# Altium footprint library WC_.PcbLib: 20 footprints (part 1 of 2)
Each footprint in its own frame and in the unit in brackets; x right, y up, seen from the top. Pads: shape width x height; smd on the part's side, far side on the other; paste and mask are expansions set on the pad; w line width, h text height; cw(c..) or ccw(c..) is an arc to the next point about the centre after c.
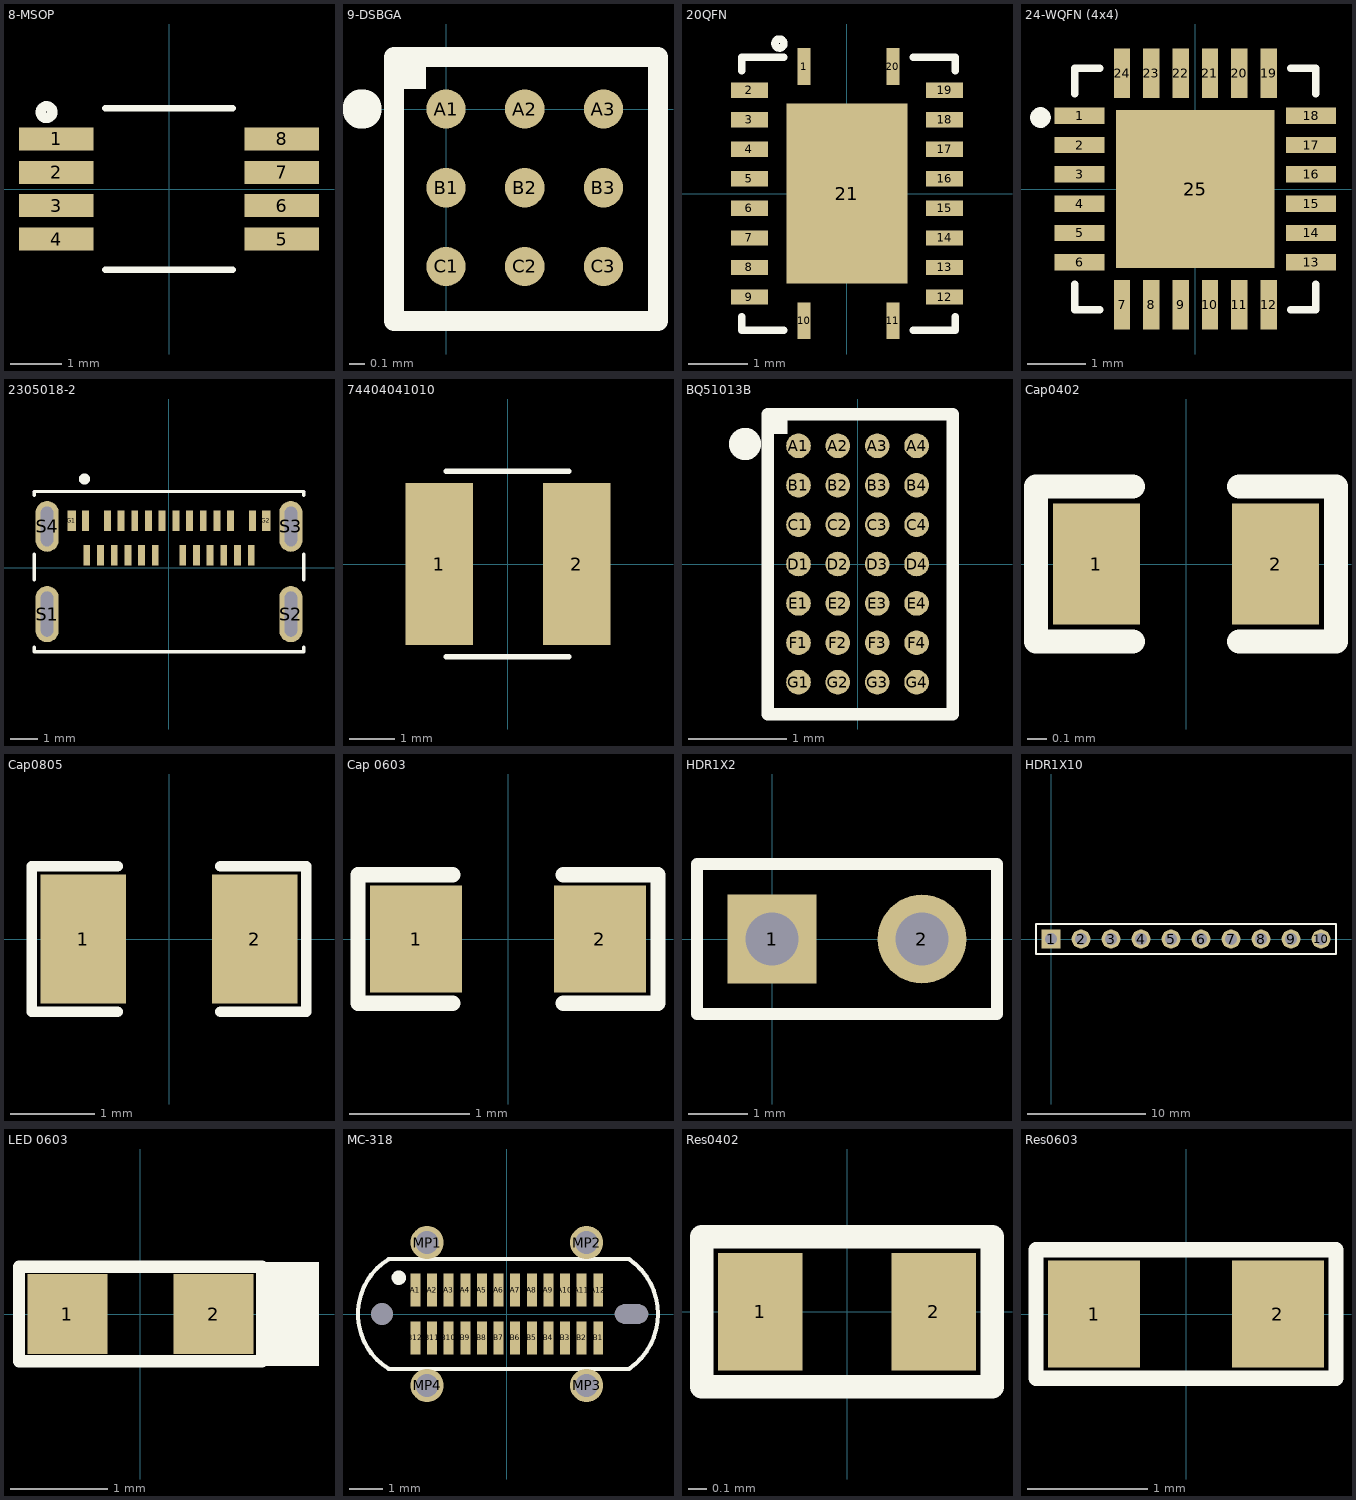
[diagram p0: the footprints below, top view; thin cyan lines are the x and y axes]

## 8-MSOP [mm]
pads (8):
  rect 1.45x0.45 smd: 1(-2.2,0.975) 2(-2.2,0.325) 3(-2.2,-0.325) 4(-2.2,-0.975) 5(2.2,-0.975) 6(2.2,-0.325) 7(2.2,0.325) 8(2.2,0.975)
Top Overlay:
  circle w0.2: c-2.388,1.499 r0.114
  lines w0.127: -1.245,-1.575 1.245,-1.575 ; -1.245,1.575 1.245,1.575
3D body "User Library-MSOP-8 MSOP-8L.step": height 1.01, standoff 0, extent -2.46,-1.525 2.46,1.525

## 9-DSBGA [mm]
pads (9):
  round 0.25 smd mask+0.055: A1(0,0) A2(0.5,0) A3(1,0) B1(0,-0.5) B2(0.5,-0.5) B3(1,-0.5) C1(0,-1) C2(0.5,-1) C3(1,-1)
Top Overlay:
  circle w0.2: c-0.533,0 r0.025
  rectangle: -0.33,0.127 -0.127,0.33
  lines w0.127: -0.33,-1.346 -0.33,0.33 1.346,0.33 1.346,-1.346 -0.33,-1.346
3D body "CSD75207W15--3DModel-STEP-231308.STEP": height 0.63, standoff 0, extent -0.302,-1.298 1.318,0.282

## 20QFN [mm]
pads (21):
  rect 0.22x0.62 smd: 1(-0.725,2.15) 10(-0.725,-2.15) 11(0.775,-2.15) 20(0.775,2.15)
  rect 0.62x0.26 smd: 2(-1.65,1.75) 3(-1.65,1.25) 4(-1.65,0.75) 5(-1.65,0.25) 6(-1.65,-0.25) 7(-1.65,-0.75) 8(-1.65,-1.25) 9(-1.65,-1.75) 12(1.65,-1.75) 13(1.65,-1.25) 14(1.65,-0.75) 15(1.65,-0.25) 16(1.65,0.25) 17(1.65,0.75) 18(1.65,1.25) 19(1.65,1.75)
  rect 2.05x3.05 smd: 21(0,0)
Top Overlay:
  circle w0.127: c-1.143,2.54 r0.076
  lines w0.127: -1.778,-2.083 -1.778,-2.311 -1.067,-2.311 ; -1.778,2.083 -1.778,2.311 -1.067,2.311 ; 1.118,-2.311 1.829,-2.311 1.829,-2.083 ; 1.118,2.311 1.829,2.311 1.829,2.083
3D body "User Library-20-VQFN (3_5x4_5).step": height 0.88, standoff -0.02, extent -1.735,-2.259 1.785,2.261

## 24-WQFN (4x4) [mm]
pads (25):
  rect 0.85x0.28 smd: 1(-1.975,1.25) 2(-1.975,0.75) 3(-1.975,0.25) 4(-1.975,-0.25) 5(-1.975,-0.75) 6(-1.975,-1.25) 13(1.975,-1.25) 14(1.975,-0.75) 15(1.975,-0.25) 16(1.975,0.25) 17(1.975,0.75) 18(1.975,1.25)
  rect 0.28x0.85 smd: 7(-1.25,-1.975) 8(-0.75,-1.975) 9(-0.25,-1.975) 10(0.25,-1.975) 11(0.75,-1.975) 12(1.25,-1.975) 19(1.25,1.975) 20(0.75,1.975) 21(0.25,1.975) 22(-0.25,1.975) 23(-0.75,1.975) 24(-1.25,1.975)
  rect 2.7x2.7 smd: 25(0,0)
Top Overlay:
  circle w0.2: c-2.642,1.219 r0.076
  lines w0.127: -2.057,-1.626 -2.057,-2.057 -1.626,-2.057 ; -2.057,1.626 -2.057,2.057 -1.626,2.057 ; 1.626,-2.057 2.057,-2.057 2.057,-1.626 ; 1.626,2.057 2.057,2.057 2.057,1.626
3D body "CP2104-F03-GMR.STEP": height 0.78, standoff -0.02, extent -2,-2 2,2

## 2305018-2 [mm] "CONN RCP USB3.1 TYPEC 24P SMD RA"
pads (30):
  rect 0.25x0.75 smd: A1(-3.05,1.7) A2(-2.25,1.7) A3(-1.75,1.7) A4(-1.25,1.7) A5(-0.75,1.7) A6(-0.25,1.7) A7(0.25,1.7) A8(0.75,1.7) A9(1.25,1.7) A10(1.75,1.7) A11(2.25,1.7) A12(3.05,1.7) B1(3,0.45) B2(2.5,0.45) B3(2,0.45) B4(1.5,0.45) B5(1,0.45) B6(0.5,0.45) B7(-0.5,0.45) B8(-1,0.45) B9(-1.5,0.45) B10(-2,0.45) B11(-2.5,0.45) B12(-3,0.45)
  rect 0.3x0.75 smd: G1(-3.55,1.7) G2(3.55,1.7)
  oval 0.85x2.05 hole 0.45 slot 1.65 at 90 deg: S1(-4.45,-1.7) S2(4.45,-1.7)
  oval 0.85x1.85 hole 0.45 slot 1.45 at 90 deg: S3(4.45,1.5) S4(-4.45,1.5)
Top Overlay:
  circle w0.2: c-3.085,3.232 r0.1
  lines w0.127: -4.925,-2.906 -4.925,-3.075 4.925,-3.075 4.925,-2.906 ; -4.925,-0.444 -4.925,0.48 ; -4.925,2.634 -4.925,2.775 4.925,2.775 4.925,2.634 ; 4.925,-0.444 4.925,0.48
Mechanical 13:
  lines w0.127: -4.925,2.775 4.925,2.775
3D body "2305018-2--3DModel-STEP-56544.STEP": height 3.53, standoff -0.53, extent -4.919,-5.856 4.919,2.794

## 74404041010 [mm]
pads (2):
  rect 1.5x3.6 smd: 1(-1.525,0) 2(1.525,0)
Top Overlay:
  lines w0.127: -1.372,-2.057 1.346,-2.057 ; -1.372,2.057 1.346,2.057
3D body "Download_STP_WE-LQS-4012 (rev1).stp": height 1.17, standoff -0.03, extent -2,-2 2,2

## BQ51013B [mm] "IC WIRELESS PWR RCVR 28DSBGA"
pads (28):
  round 0.25 smd mask+0.055: A1(-0.6,1.2) A2(-0.2,1.2) A3(0.2,1.2) A4(0.6,1.2) B1(-0.6,0.8) B2(-0.2,0.8) B3(0.2,0.8) B4(0.6,0.8) C1(-0.6,0.4) C2(-0.2,0.4) C3(0.2,0.4) C4(0.6,0.4) D1(-0.6,0) D2(-0.2,0) D3(0.2,0) D4(0.6,0) E1(-0.6,-0.4) E2(-0.2,-0.4) E3(0.2,-0.4) E4(0.6,-0.4) F1(-0.6,-0.8) F2(-0.2,-0.8) F3(0.2,-0.8) F4(0.6,-0.8) G1(-0.6,-1.2) G2(-0.2,-1.2) G3(0.2,-1.2) G4(0.6,-1.2)
Top Overlay:
  circle w0.254: c-1.143,1.219 r0.036
  rectangle: -0.914,1.321 -0.711,1.524
  lines w0.127: -0.914,-1.524 0.965,-1.524 0.965,1.524 -0.914,1.524 -0.914,-1.524
3D body "BQ51013BYFPT.STEP": height 0.48, standoff -0.02, extent -0.941,-1.503 0.941,1.503

## Cap0402 [mil]
pads (2):
  rect 18x25 smd mask+2.36: 1(-18.5,0) 2(18.5,0)
Top Overlay:
  lines w5: -11,-16 -31,-16 -31,16 -11,16 ; 11,-16 31,-16 31,16 11,16
3D body "User Library-Capacitor 0402.step": height 18.5, standoff -1.18, extent -19.68,-9.84 19.7,9.85

## Cap0805 [mil] "SMD 0805"
pads (2):
  rect 40x60 smd mask+2.76: 1(-40,0) 2(40,0)
Top Overlay:
  lines w5: -24,-34 -64,-34 -64,34 -24,34 ; 24,-34 64,-34 64,34 24,34
3D body "User Library-0805 SMD Capacitor.step": height 30, standoff -0.79, extent -39.36,-24.6 39.38,24.61

## Cap 0603 [mil]
pads (2):
  rect 30x35 smd mask+2.36: 1(-30,0) 2(30,0)
Top Overlay:
  lines w5: -18,-21 -49,-21 -49,21 -18,21 ; 18,-21 49,-21 49,21 18,21
3D body "User Library-CAPC1608X09.step": height 34.25, standoff -1.18, extent -31.51,-15.75 31.49,15.74

## HDR1X2 [mm] "CONN HEADER VERT 2POS 2.54MM"
pads (2):
  rect 1.5x1.5 hole 0.9: 1(0,0)
  round 1.5 hole 0.9: 2(2.54,0)
Top Overlay:
  lines w0.2: -1.27,-1.27 3.81,-1.27 3.81,1.27 -1.27,1.27 -1.27,-1.27
3D body "User Library-Header1x2.STEP": height 8.44, standoff -2.54, extent -1.27,-1.27 3.81,1.27

## HDR1X10 [mm] "Connector; Header; 10 Position"
pads (10):
  rect 1.6x1.6 hole 1: 1(0,0)
  round 1.6 hole 1: 2(2.54,0) 3(5.08,0) 4(7.62,0) 5(10.16,0) 6(12.7,0) 7(15.24,0) 8(17.78,0) 9(20.32,0) 10(22.86,0)
Top Overlay:
  lines w0.2: -1.27,-1.27 -1.27,1.27 0.635,1.27 24.13,1.27 24.13,-1.27 -1.27,-1.27
3D body "User Library-1x10 TH Pitch 2_54mm.STEP": height 9.4, standoff -3.3, extent -1.27,-1.27 24.13,1.27

## LED 0603 [mm] "LED 0603"
pads (2):
  rect 0.82x0.82 smd: 1(-0.75,0) 2(0.75,0)
Top Overlay:
  region: 1.829,0.533 1.27,0.533 1.27,-0.533 1.829,-0.533
  lines w0.127: -1.245,-0.483 1.245,-0.483 1.245,0.483 -1.245,0.483 -1.245,-0.483
3D body "User Library-SMD LED 0603.step": height 0.38, standoff -0.01, extent -0.775,-0.4 0.825,0.4

## MC-318 [mm]
pads (30):
  rect 0.3x1 smd: A1(-2.75,0.72) A2(-2.25,0.72) A3(-1.75,0.72) A4(-1.25,0.72) A5(-0.75,0.72) A6(-0.25,0.72) A7(0.25,0.72) A8(0.75,0.72) A9(1.25,0.72) A10(1.75,0.72) A11(2.25,0.72) A12(2.75,0.72) B1(2.75,-0.72) B2(2.25,-0.72) B3(1.75,-0.72) B4(1.25,-0.72) B5(0.75,-0.72) B6(0.25,-0.72) B7(-0.25,-0.72) B8(-0.75,-0.72) B9(-1.25,-0.72) B10(-1.75,-0.72) B11(-2.25,-0.72) B12(-2.75,-0.72)
  round 0 hole 0.66 unplated: MH1(-3.75,0)
  round 0 hole 0.58 slot 1 at 0 deg unplated: MH2(3.75,0)
  round 1 hole 0.7: MP1(-2.4,2.15) MP2(2.4,2.15) MP3(2.4,-2.15) MP4(-2.4,-2.15)
Top Overlay:
  circle w0.254: c-3.251,1.092 r0.092
  lines w0.125: -3.556,-1.651 cw(c-2.54,0) -3.556,1.651 3.683,1.651 cw(c2.54,0) 3.683,-1.651 -3.556,-1.651
3D body "USB4070-30-C.stp": height 10.49, standoff -1.31, extent -4.427,-2.275 4.445,2.275

## Res0402 [mil]
pads (2):
  rect 18x25 smd mask+4: 1(-18.5,0) 2(18.5,0)
Top Overlay:
  lines w0.13: -32,-17 32,-17
  lines w5: -31,-16 31,-16 31,16 -31,16 -31,-16
3D body "User Library-RES_1005-0402.step": height 16.14, standoff 0, extent -22.63,-10.82 22.64,10.83

## Res0603 [mil]
pads (2):
  rect 30x35 smd: 1(-30,0) 2(30,0)
Top Overlay:
  lines w5: -49,-21 49,-21 49,21 -49,21 -49,-21
3D body "User Library-RESC1608X05N.step": height 17.76, standoff 0, extent -30.52,-16.74 30.51,16.73